# Altium footprint library SBComponentsFootprints.PcbLib: 43 footprints (part 2 of 3)
Each footprint in its own frame and in the unit in brackets; x right, y up, seen from the top. Pads: shape width x height; smd on the part's side, far side on the other; paste and mask are expansions set on the pad; w line width, h text height; cw(c..) or ccw(c..) is an arc to the next point about the centre after c.
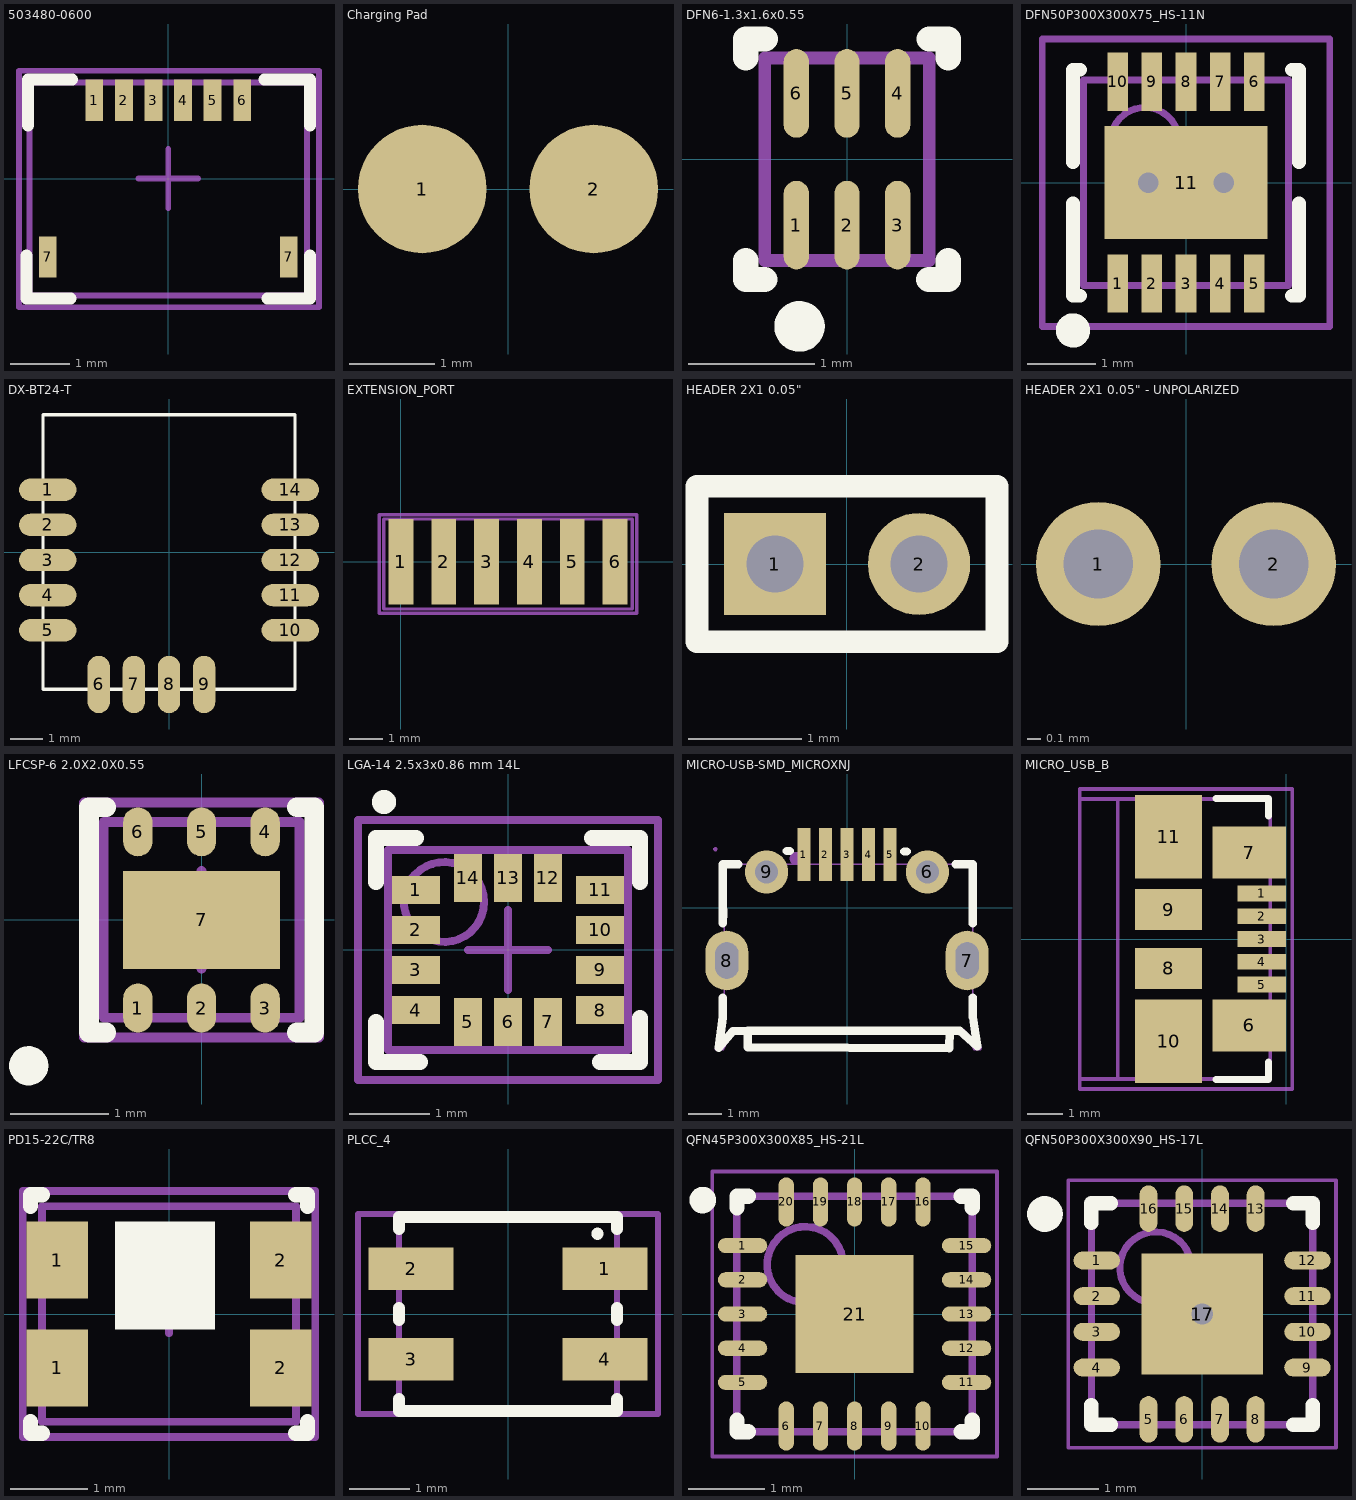
[diagram p1: the footprints below, top view; thin cyan lines are the x and y axes]

## 503480-0600 [mm]
height 1
pads (8):
  rect 0.3x0.7 smd: 1(-1.25,1.325) 2(-0.75,1.325) 3(-0.25,1.325) 4(0.25,1.325) 5(0.75,1.325) 6(1.25,1.325) 7(-2.04,-1.325) 7(2.04,-1.325)
Top Overlay:
  lines w0.2: -2.4,-1.3 -2.4,-2.025 -1.65,-2.025 ; -2.375,0.9 -2.375,1.675 -1.625,1.675 ; 1.625,1.675 2.4,1.675 2.4,0.9 ; 1.675,-2.025 2.4,-2.025 2.4,-1.3
Mechanical 1:
  lines w0.1: -2.35,-1.975 -2.35,1.625 2.35,1.625 2.35,-1.975 -2.35,-1.975
Mechanical 15:
  lines w0.1: -0.5,0 0.5,0 ; 0,-0.5 0,0.5 ; -2.525,-2.175 -2.525,1.825 2.55,1.825 2.55,-2.175 -2.525,-2.175
3D body "5034800600.stp": height 1.89, standoff -0.01, extent -2.35,-1.975 2.35,1.625

## Charging Pad [mm]
pads (2):
  round 1.5 smd paste-5: 1(-1,0) 2(1,0)
3D body: height 0, standoff 0, extent 0.252,-0.749 1.746,0.749
3D body: height 0, standoff 0, extent -1.744,-0.749 -0.25,0.749

## DFN6-1.3x1.6x0.55 [mm]
height 0.55
pads (6):
  oval 0.2x0.7 smd: 1(-0.4,-0.52) 2(0,-0.52) 3(0.4,-0.52) 4(0.4,0.52) 5(0,0.52) 6(-0.4,0.52)
Top Overlay:
  circle w0.2: c-0.375,-1.32 r0.1
  lines w0.2: -0.8,-0.8 -0.8,-0.95 -0.65,-0.95 ; -0.8,0.8 -0.8,0.95 -0.645,0.95 ; 0.645,-0.95 0.8,-0.95 0.8,-0.8 ; 0.65,0.95 0.8,0.95 0.8,0.8
Mechanical 13:
  lines w0.1: -0.65,-0.8 -0.65,0.8 0.65,0.8 0.65,-0.8 -0.65,-0.8
3D body: height 0.55, standoff 0, extent -0.65,-0.8 0.65,0.8

## DFN50P300X300X75_HS-11N [mm]
pads (11):
  rect 0.3x0.85 smd: 1(-1,-1.475) 2(-0.5,-1.475) 3(0,-1.475) 4(0.5,-1.475) 5(1,-1.475) 6(1,1.475) 7(0.5,1.475) 8(0,1.475) 9(-0.5,1.475) 10(-1,1.475)
  rect 2.38x1.65 smd: 11(0,0)
via 0.55,0 diameter 0.6 hole 0.3
via -0.55,0 diameter 0.6 hole 0.3
Top Overlay:
  circle w0.25: c-1.651,-2.159 r0.125
  lines w0.2: -1.65,-0.3 -1.65,-1.65 -1.55,-1.65 ; -1.65,0.3 -1.65,1.65 -1.55,1.65 ; 1.55,-1.65 1.65,-1.65 1.65,-0.3 ; 1.55,1.65 1.65,1.65 1.65,0.3
Mechanical 13:
  circle w0.1: c-0.6,0.6 r0.5
  lines w0.1: -1.5,-1.5 1.5,-1.5 1.5,1.5 -1.5,1.5 -1.5,-1.5
Mechanical 15:
  lines w0.1: -0.5,0 0.5,0 ; 0,-0.5 0,0.5 ; -2.1,-2.1 2.1,-2.1 2.1,2.1 -2.1,2.1 -2.1,-2.1
3D body: height 0.75, standoff 0, extent -1.5,-1.5 1.5,1.5

## DX-BT24-T [mm] "DX-BT24-T"
height 2.1
pads (14):
  oval 1.8x0.7 smd: 1(-3.8,1.95) 2(-3.8,0.85) 3(-3.8,-0.25) 4(-3.8,-1.35) 5(-3.8,-2.45) 10(3.8,-2.45) 11(3.8,-1.35) 12(3.8,-0.25) 13(3.8,0.85) 14(3.8,1.95)
  oval 0.7x1.8 smd: 6(-2.2,-4.15) 7(-1.1,-4.15) 8(0,-4.15) 9(1.1,-4.15)
Top Overlay:
  lines w0.1: -3.95,-4.3 -3.95,4.3 3.95,4.3 3.95,-4.3 -3.95,-4.3

## EXTENSION_PORT [mil]
pads (6):
  rect 29x100 smd paste-78.74: 1(0,0) 2(50,0) 3(100,0) 4(150,0) 5(200,0) 6(250,0)
Mechanical 13:
  lines w3.94: -20,-55 270,-55 270,50 -20,50 -20,-55
Mechanical 15:
  lines w3.94: -25,-60 -25,55 275,55 275,-60 -25,-60
3D body: height 0.04, standoff 0, extent -15,-45 265,45

## HEADER 2X1 0.05" [mm]
pads (2):
  rect 0.9x0.9 hole 0.5: 1(-0.635,0)
  round 0.9 hole 0.5: 2(0.635,0)
Top Overlay:
  lines w0.2: -1.321,-0.686 -1.321,0.686 1.321,0.686 1.321,-0.686 -1.321,-0.686
3D body: height 0.01, standoff 0, extent -1.25,-0.6 1.25,0.6

## HEADER 2X1 0.05" - UNPOLARIZED [mm]
pads (2):
  round 0.9 hole 0.5: 1(-0.635,0) 2(0.635,0)
3D body: height 0.01, standoff 0, extent -1.25,-0.6 1.25,0.6

## LFCSP-6 2.0X2.0X0.55 [mm] ". 6-Lead Lead Frame Chip Scale Package [LFCSP_UD]  2.00 mm?2.00 mm Body, Ultra Thin, Dual Lead  (CP-6-3)"
height 0.55
pads (7):
  oval 0.3x0.5 smd: 1(-0.65,-0.9) 2(0,-0.9) 3(0.65,-0.9) 4(0.65,0.9) 5(0,0.9) 6(-0.65,0.9)
  rect 1.6x1 smd: 7(0,0)
Top Overlay:
  circle w0.2: c-1.765,-1.49 r0.1
  lines w0.2: -1.15,-1.15 -0.975,-1.15 ; -1.15,-1.125 -1.15,1.15 -0.975,1.15 ; 0.975,-1.15 1.15,-1.15 1.15,1.125 ; 0.975,1.15 1.15,1.15
Mechanical 13:
  lines w0.1: -1,-1 1,-1 1,1 -1,1 -1,-1
Mechanical 15:
  lines w0.1: -0.5,0 0.5,0 ; 0,-0.5 0,0.5 ; -1.2,-1.2 1.2,-1.2 1.2,1.2 -1.2,1.2 -1.2,-1.2
3D body: height 0.6, standoff 0.05, extent -1,-1 1,1

## LGA-14 2.5x3x0.86 mm 14L [mm] "LGA, 14-Leads, Body 3.00x2.50mm, Pitch 0.50mm, IPC High Density"
height 0.86
pads (14):
  rect 0.6x0.35 smd: 1(-1.15,0.75) 2(-1.15,0.25) 3(-1.15,-0.25) 4(-1.15,-0.75) 8(1.15,-0.75) 9(1.15,-0.25) 10(1.15,0.25) 11(1.15,0.75)
  rect 0.35x0.6 smd: 5(-0.5,-0.9) 6(0,-0.9) 7(0.5,-0.9) 12(0.5,0.9) 13(0,0.9) 14(-0.5,0.9)
Top Overlay:
  circle w0.2: c-1.55,1.85 r0.05
  lines w0.2: -1.65,-0.9 -1.65,-1.4 -1.1,-1.4 ; -1.65,0.85 -1.65,1.4 -1.15,1.4 ; 1.05,1.4 1.65,1.4 1.65,0.85 ; 1.15,-1.4 1.65,-1.4 1.65,-0.85
Mechanical 13:
  circle w0.1: c-0.8,0.6 r0.5
  lines w0.1: -1.5,-1.25 -1.5,1.25 1.5,1.25 1.5,-1.25 -1.5,-1.25
Mechanical 15:
  lines w0.1: -0.5,0 0.5,0 ; 0,-0.5 0,0.5 ; -1.875,-1.625 1.875,-1.625 1.875,1.625 -1.875,1.625 -1.875,-1.625
3D body: height 0.86, standoff 0.13, extent -1.5,-1.25 1.5,1.25

## MICRO-USB-SMD_MICROXNJ [mm]
pads (9):
  rect 0.4x1.6 smd paste-100 mask+0.051: 1(-1.3,1.596) 2(-0.65,1.596) 3(0,1.596) 4(0.65,1.596) 5(1.3,1.596)
  round 1.3 hole 0.7: 6(2.425,1.074) 9(-2.425,1.074)
  oval 1.3x1.8 hole 0.7 slot 1.1 at 90 deg: 7(3.625,-1.596) 8(-3.625,-1.596)
Top Overlay:
  lines w0.254: -3.745,-2.719 -3.745,-3.315 -3.87,-4.23 -3.45,-3.735 -3,-3.715 ; -3.745,-0.473 -3.745,1.31 -3.274,1.31 ; -3.735,-0.276 -3.731,-0.068 ; -3.733,-0.275 -3.732,-0.101 ; -1.814,1.707 -1.731,1.707 ; 1.731,1.693 1.799,1.693 ; 3.274,1.31 3.79,1.31 3.79,-0.481 ; 3.79,-3.304 3.79,-2.712 ; 3.8,-3.304 3.93,-4.19 3.4,-3.715 3.1,-3.715 ; -3,-3.715 -3,-4.215 3.09,-4.245 3.1,-3.715 ; -3,-3.715 3.1,-3.715
Top Paste:
  drawing of 9 lines, arcs and shapes, not listed
Mechanical 6:
  circle w0.2: c-1.53,1.479 r0.1
Mechanical 15:
  region: 1.175,0.966 1.175,1.966 1.425,1.966 1.425,0.966
  region: 0.525,0.966 0.525,1.966 0.775,1.966 0.775,0.966
  region: -0.125,0.966 -0.125,1.966 0.125,1.966 0.125,0.966
  region: -0.775,0.966 -0.775,1.966 -0.525,1.966 -0.525,0.966
  region: -1.425,0.966 -1.425,1.966 -1.175,1.966 -1.175,0.966
  region: 2.175,0.974 2.175,1.174 2.675,1.174 2.675,0.974
  region: -2.675,0.974 -2.675,1.174 -2.175,1.174 -2.175,0.974
  region: 3.475,-1.141 3.775,-1.141 3.775,-2.051 3.475,-2.051
  region: -3.775,-1.141 -3.475,-1.141 -3.475,-2.051 -3.775,-2.051
  region: -3.91,1.766 -3.91,1.791 -3.945,1.826 -3.995,1.826 -4.03,1.791 -4.03,1.766 -4.03,1.741 -3.995,1.706 -3.945,1.706 -3.91,1.741
  lines w0.051: -3.97,-4.281 -3.7,-3.681 -3.7,1.299 -3.7,1.309 3.79,1.309 3.79,-3.671 4.05,-4.221 4.03,-4.281 3.83,-4.281 3.54,-3.691 3.15,-3.691 3.15,-4.291 -3.03,-4.281 -3.05,-4.281 -3.05,-3.691 -3.45,-3.691 -3.74,-4.291 -3.97,-4.281

## MICRO_USB_B [mm]
pads (11):
  rect 1.38x0.45 smd: 1(-0.69,1.3) 2(-0.69,0.65) 3(-0.69,0) 4(-0.69,-0.65) 5(-0.69,-1.3)
  rect 2.1x1.475 smd: 6(-1.05,-2.462) 7(-1.05,2.462)
  rect 1.9x1.175 smd: 8(-3.35,-0.837) 9(-3.35,0.837)
  rect 1.9x2.375 smd: 10(-3.35,-2.913) 11(-3.35,2.913)
Top Overlay:
  lines w0.2: -2,-4 -0.5,-4 -0.5,-3.5 ; -2,4 -0.5,4 -0.5,3.5
Mechanical 1:
  lines w0.1: -5.88,3.99 -5.88,-3.99 -0.45,-3.99 ; -4.8,-4 -4.8,4
Mechanical 13:
  lines w0.1: -5.88,3.99 -0.45,3.99 -0.45,-3.99
Mechanical 15:
  lines w0.1: -5.875,-4.275 0.175,-4.275 0.175,4.275 -5.875,4.275 -5.875,-4.275
3D body "micro_usb.stp": height 2.69, standoff -0.25, extent -5.88,-3.99 -0.45,3.99

## PD15-22C/TR8 [mm] "Silicon PIN Photodiode"
height 1.1
pads (4):
  rect 0.8x1 smd: 1(-1.45,-0.7) 1(-1.45,0.7) 2(1.45,-0.7) 2(1.45,0.7)
Top Overlay:
  rectangle: -0.7,-0.2 0.6,1.2
  lines w0.2: -1.8,-1.4 -1.8,-1.55 -1.65,-1.55 ; -1.8,1.4 -1.8,1.55 -1.65,1.55 ; 1.65,-1.55 1.8,-1.55 1.8,-1.4 ; 1.65,1.55 1.8,1.55 1.8,1.4
Mechanical 1:
  lines w0.1: -1.65,-1.4 1.65,-1.4 1.65,1.4 -1.65,1.4 -1.65,-1.4
Mechanical 15:
  lines w0.1: -0.25,0 0.25,0 ; 0,-0.25 0,0.25 ; -1.9,-1.6 1.9,-1.6 1.9,1.6 -1.9,1.6 -1.9,-1.6
3D body: height 1.1, standoff 0, extent -1.65,-1.4 1.65,1.4

## PLCC_4 [mm]
height 1.9
pads (4):
  rect 1.4x0.7 smd: 1(1.6,0.75) 2(-1.6,0.75) 3(-1.6,-0.75) 4(1.6,-0.75)
Top Overlay:
  circle w0.2: c1.475,1.325 r0.001
  lines w0.2: -1.8,-1.4 -1.8,-1.6 1.8,-1.6 1.8,-1.4 ; -1.8,-0.1 -1.8,0.1 ; -1.8,1.4 -1.8,1.6 1.8,1.6 1.8,1.4 ; 1.8,-0.1 1.8,0.1
Mechanical 1:
  lines w0.1: -1.8,-1.6 1.8,-1.6 1.8,1.6 -1.8,1.6 -1.8,-1.6
Mechanical 15:
  lines w0.1: -2.475,-1.65 2.475,-1.65 2.475,1.65 -2.475,1.65 -2.475,-1.65
3D body: height 1.9, standoff 0, extent -1.8,-1.6 1.8,1.6

## QFN45P300X300X85_HS-21L [mm] "QFN, 20-Leads, Body 3.00x3.00mm, Pitch 0.45mm, Thermal Pad 1.55x1.55mm, IPC High Density"
height 0.85
pads (21):
  oval 0.65x0.2 smd: 1(-1.475,0.9) 2(-1.475,0.45) 3(-1.475,0) 4(-1.475,-0.45) 5(-1.475,-0.9) 11(1.475,-0.9) 12(1.475,-0.45) 13(1.475,0) 14(1.475,0.45) 15(1.475,0.9)
  oval 0.2x0.65 smd: 6(-0.9,-1.475) 7(-0.45,-1.475) 8(0,-1.475) 9(0.45,-1.475) 10(0.9,-1.475) 16(0.9,1.475) 17(0.45,1.475) 18(0,1.475) 19(-0.45,1.475) 20(-0.9,1.475)
  rect 1.55x1.55 smd: 21(0,0)
Top Overlay:
  circle w0.2: c-2,1.5 r0.075
  lines w0.2: -1.55,-1.4 -1.55,-1.55 -1.4,-1.55 ; -1.55,1.4 -1.55,1.55 -1.4,1.55 ; 1.4,-1.55 1.55,-1.55 1.55,-1.4 ; 1.4,1.55 1.55,1.55 1.55,1.4
Mechanical 13:
  circle w0.1: c-0.65,0.65 r0.5
  lines w0.1: -1.55,-1.55 -1.55,1.55 1.55,1.55 1.55,-1.55 -1.55,-1.55
Mechanical 15:
  lines w0.05: -1.875,-1.875 -1.875,1.875 1.875,1.875 1.875,-1.875 -1.875,-1.875
  lines w0.1: -0.5,0 0.5,0 ; 0,-0.5 0,0.5
3D body: height 0.85, standoff 0.05, extent -1.55,-1.55 1.55,1.55

## QFN50P300X300X90_HS-17L [mm] "QFN, 16-Leads, Body 3,00x3,00mm, Pitch 0,50mm, Thermal Pad 1,70x1,70mm, IPC High Density"
height 0.9
pads (17):
  oval 0.65x0.25 smd: 1(-1.475,0.75) 2(-1.475,0.25) 3(-1.475,-0.25) 4(-1.475,-0.75) 9(1.475,-0.75) 10(1.475,-0.25) 11(1.475,0.25) 12(1.475,0.75)
  oval 0.25x0.65 smd: 5(-0.75,-1.475) 6(-0.25,-1.475) 7(0.25,-1.475) 8(0.75,-1.475) 13(0.75,1.475) 14(0.25,1.475) 15(-0.25,1.475) 16(-0.75,1.475)
  rect 1.7x1.7 smd: 17(0,0)
via 0,0 diameter 0.6 hole 0.3
Top Overlay:
  circle w0.25: c-2.2,1.4 r0.125
  lines w0.2: -1.55,-1.275 -1.55,-1.55 -1.275,-1.55 ; -1.55,1.275 -1.55,1.55 -1.275,1.55 ; 1.275,-1.55 1.55,-1.55 1.55,-1.275 ; 1.275,1.55 1.55,1.55 1.55,1.275
Mechanical 13:
  circle w0.1: c-0.65,0.65 r0.5
  lines w0.1: -1.55,-1.55 1.55,-1.55 1.55,1.55 -1.55,1.55 -1.55,-1.55
Mechanical 15:
  lines w0.05: -1.875,-1.875 1.875,-1.875 1.875,1.875 -1.875,1.875 -1.875,-1.875
  lines w0.1: -0.5,0 0.5,0 ; 0,-0.5 0,0.5
3D body: height 0.9, standoff 0.05, extent -1.55,-1.55 1.55,1.55